# Altium footprint library Resistor.PcbLib: 85 footprints (part 5 of 6)
Each footprint in its own frame and in the unit in brackets; x right, y up, seen from the top. Pads: shape width x height; smd on the part's side, far side on the other; paste and mask are expansions set on the pad; w line width, h text height; cw(c..) or ccw(c..) is an arc to the next point about the centre after c.
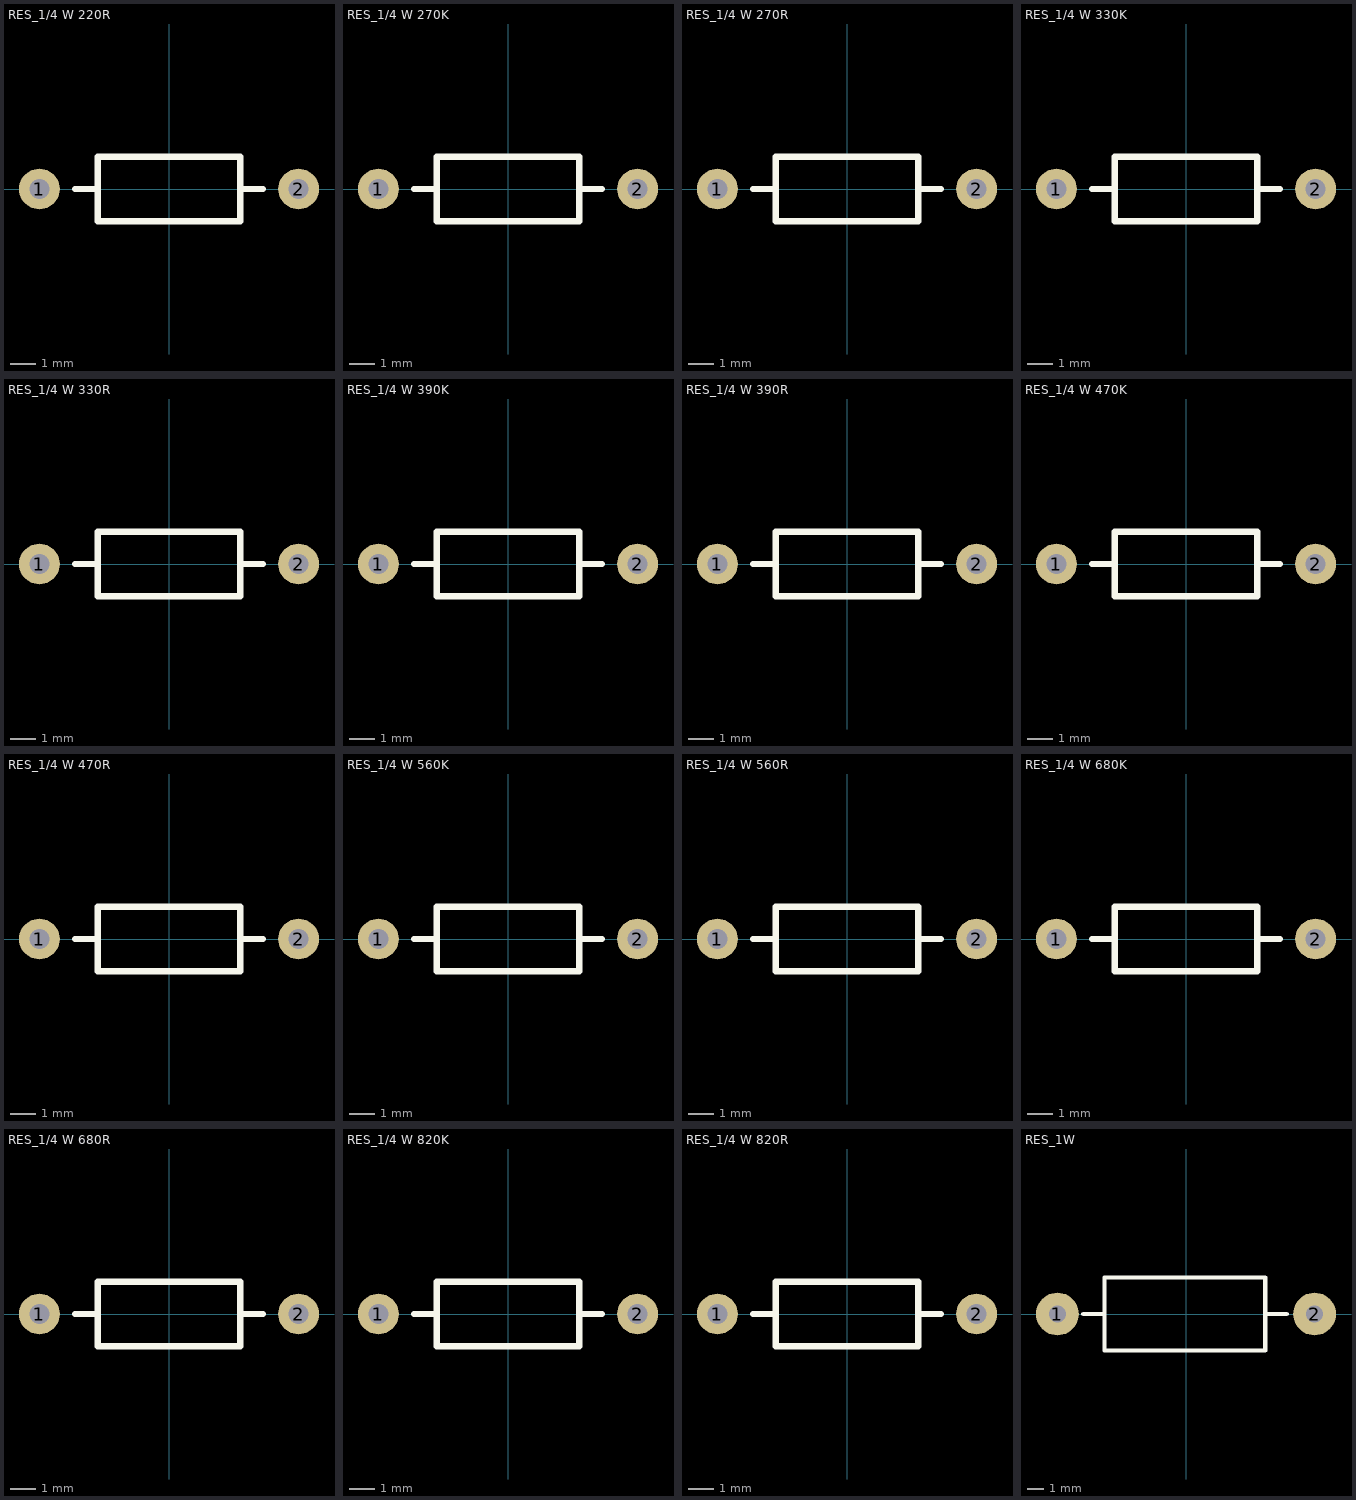
[diagram p4: the footprints below, top view; thin cyan lines are the x and y axes]

## RES_1/4 W 220R [mm]
pads (2):
  round 1.6 hole 0.787: 1(-5.08,0) 2(5.08,0)
Top Overlay:
  lines w0.254: -3.683,0 -2.794,0 ; 2.794,0 3.683,0 ; -2.794,-1.27 -2.794,1.27 2.794,1.27 2.794,-1.27 -2.794,-1.27
Top Designator:
  text ".Designator" at -3.71,-0.344 h1.52
3D body "220R.step": height 2.51, standoff -2, extent -5.255,-1.152 5.255,1.152

## RES_1/4 W 270K [mm]
pads (2):
  round 1.6 hole 0.787: 1(-5.08,0) 2(5.08,0)
Top Overlay:
  lines w0.254: -3.683,0 -2.794,0 ; 2.794,0 3.683,0 ; -2.794,-1.27 2.794,-1.27 2.794,1.27 -2.794,1.27 -2.794,-1.27
Top Designator:
  text ".Designator" at -3.71,-0.344 h1.52
3D body "270K.step": height 2.51, standoff -2, extent -5.255,-1.151 5.255,1.152

## RES_1/4 W 270R [mm]
pads (2):
  round 1.6 hole 0.787: 1(-5.08,0) 2(5.08,0)
Top Overlay:
  lines w0.254: -3.683,0 -2.794,0 ; 2.794,0 3.683,0 ; -2.794,-1.27 2.794,-1.27 2.794,1.27 -2.794,1.27 -2.794,-1.27
Top Designator:
  text ".Designator" at -3.71,-0.344 h1.52
3D body "270R.step": height 2.51, standoff -2, extent -5.255,-1.151 5.255,1.152

## RES_1/4 W 330K [mm]
pads (2):
  round 1.6 hole 0.787: 1(-5.08,0) 2(5.08,0)
Top Overlay:
  lines w0.254: -3.683,0 -2.794,0 ; 2.794,0 3.683,0 ; -2.794,-1.27 2.794,-1.27 2.794,1.27 -2.794,1.27 -2.794,-1.27
Top Designator:
  text ".Designator" at -3.71,-0.344 h1.52
3D body "330K.step": height 2.51, standoff -2, extent -5.255,-1.152 5.255,1.152

## RES_1/4 W 330R [mm]
pads (2):
  round 1.6 hole 0.787: 1(-5.08,0) 2(5.08,0)
Top Overlay:
  lines w0.254: -3.683,0 -2.794,0 ; 2.794,0 3.683,0 ; -2.794,-1.27 2.794,-1.27 2.794,1.27 -2.794,1.27 -2.794,-1.27
Top Designator:
  text ".Designator" at -3.71,-0.344 h1.52
3D body "330R.step": height 2.51, standoff -2, extent -5.255,-1.152 5.255,1.152

## RES_1/4 W 390K [mm]
pads (2):
  round 1.6 hole 0.787: 1(-5.08,0) 2(5.08,0)
Top Overlay:
  lines w0.254: -3.683,0 -2.794,0 ; 2.794,0 3.683,0 ; -2.794,-1.27 2.794,-1.27 2.794,1.27 -2.794,1.27 -2.794,-1.27
Top Designator:
  text ".Designator" at -3.71,-0.344 h1.52
3D body "390K.step": height 2.51, standoff -2, extent -5.255,-1.151 5.255,1.152

## RES_1/4 W 390R [mm]
pads (2):
  round 1.6 hole 0.787: 1(-5.08,0) 2(5.08,0)
Top Overlay:
  lines w0.254: -3.683,0 -2.794,0 ; 2.794,0 3.683,0 ; -2.794,-1.27 2.794,-1.27 2.794,1.27 -2.794,1.27 -2.794,-1.27
Top Designator:
  text ".Designator" at -3.71,-0.344 h1.52
3D body "390R.step": height 2.51, standoff -2, extent -5.255,-1.151 5.255,1.152

## RES_1/4 W 470K [mm]
pads (2):
  round 1.6 hole 0.787: 1(-5.08,0) 2(5.08,0)
Top Overlay:
  lines w0.254: -3.683,0 -2.794,0 ; 2.794,0 3.683,0 ; -2.794,-1.27 -2.794,1.27 2.794,1.27 2.794,-1.27 -2.794,-1.27
Top Designator:
  text ".Designator" at -3.71,-0.344 h1.52
3D body "470K.step": height 2.51, standoff -2, extent -5.255,-1.152 5.255,1.152

## RES_1/4 W 470R [mm]
pads (2):
  round 1.6 hole 0.787: 1(-5.08,0) 2(5.08,0)
Top Overlay:
  lines w0.254: -3.683,0 -2.794,0 ; 2.794,0 3.683,0 ; -2.794,-1.27 -2.794,1.27 2.794,1.27 2.794,-1.27 -2.794,-1.27
Top Designator:
  text ".Designator" at -3.71,-0.344 h1.52
3D body "470R (1).step": height 2.51, standoff -2, extent -5.255,-1.151 5.255,1.152

## RES_1/4 W 560K [mm]
pads (2):
  round 1.6 hole 0.787: 1(-5.08,0) 2(5.08,0)
Top Overlay:
  lines w0.254: -3.683,0 -2.794,0 ; 2.794,0 3.683,0 ; -2.794,-1.27 -2.794,1.27 2.794,1.27 2.794,-1.27 -2.794,-1.27
Top Designator:
  text ".Designator" at -3.71,-0.344 h1.52
3D body "560K.step": height 2.51, standoff -2, extent -5.255,-1.151 5.255,1.152

## RES_1/4 W 560R [mm]
pads (2):
  round 1.6 hole 0.787: 1(-5.08,0) 2(5.08,0)
Top Overlay:
  lines w0.254: -3.683,0 -2.794,0 ; 2.794,0 3.683,0 ; -2.794,-1.27 -2.794,1.27 2.794,1.27 2.794,-1.27 -2.794,-1.27
Top Designator:
  text ".Designator" at -3.71,-0.344 h1.52
3D body "560R.step": height 2.51, standoff -2, extent -5.255,-1.152 5.255,1.152

## RES_1/4 W 680K [mm]
pads (2):
  round 1.6 hole 0.787: 1(-5.08,0) 2(5.08,0)
Top Overlay:
  lines w0.254: -3.683,0 -2.794,0 ; 2.794,0 3.683,0 ; -2.794,-1.27 -2.794,1.27 2.794,1.27 2.794,-1.27 -2.794,-1.27
Top Designator:
  text ".Designator" at -3.71,-0.344 h1.52
3D body "680K.step": height 2.51, standoff -2, extent -5.255,-1.151 5.255,1.152

## RES_1/4 W 680R [mm]
pads (2):
  round 1.6 hole 0.787: 1(-5.08,0) 2(5.08,0)
Top Overlay:
  lines w0.254: -3.683,0 -2.794,0 ; 2.794,0 3.683,0 ; -2.794,-1.27 2.794,-1.27 2.794,1.27 -2.794,1.27 -2.794,-1.27
Top Designator:
  text ".Designator" at -3.71,-0.344 h1.52
3D body "680R.step": height 2.51, standoff -2, extent -5.255,-1.152 5.255,1.152

## RES_1/4 W 820K [mm]
pads (2):
  round 1.6 hole 0.787: 1(-5.08,0) 2(5.08,0)
Top Overlay:
  lines w0.254: -3.683,0 -2.794,0 ; 2.794,0 3.683,0 ; -2.794,-1.27 2.794,-1.27 2.794,1.27 -2.794,1.27 -2.794,-1.27
Top Designator:
  text ".Designator" at -3.71,-0.344 h1.52
3D body "820K.step": height 2.51, standoff -2, extent -5.255,-1.152 5.255,1.152

## RES_1/4 W 820R [mm]
pads (2):
  round 1.6 hole 0.787: 1(-5.08,0) 2(5.08,0)
Top Overlay:
  lines w0.254: -3.683,0 -2.794,0 ; 2.794,0 3.683,0 ; -2.794,-1.27 2.794,-1.27 2.794,1.27 -2.794,1.27 -2.794,-1.27
Top Designator:
  text ".Designator" at -3.71,-0.344 h1.52
3D body "820R.step": height 2.51, standoff -2, extent -5.255,-1.152 5.255,1.152

## RES_1W [mil] "R1W 2Pin"
pads (2):
  round 100 hole 40: 1(-300,0) 2(300,0)
Top Overlay:
  lines w10: -240,0 -190,0 ; 185,0 235,0 ; -190,0 -190,85 185,85 185,-85 -190,-85 -190,0
Top Designator:
  text ".Designator" at -146.08,-13.54 h60
Mechanical 15:
  lines w1.97: -190,-85 185,-85 185,85 -190,85 -190,-85
3D body "User Library-PR02.STEP": height 176.77, standoff -310.6, extent -315.01,-76.77 316.49,76.77